# Altium footprint library P05_ECG.PcbLib: 19 footprints (part 1 of 2)
Each footprint in its own frame and in the unit in brackets; x right, y up, seen from the top. Pads: shape width x height; smd on the part's side, far side on the other; paste and mask are expansions set on the pad; w line width, h text height; cw(c..) or ccw(c..) is an arc to the next point about the centre after c.
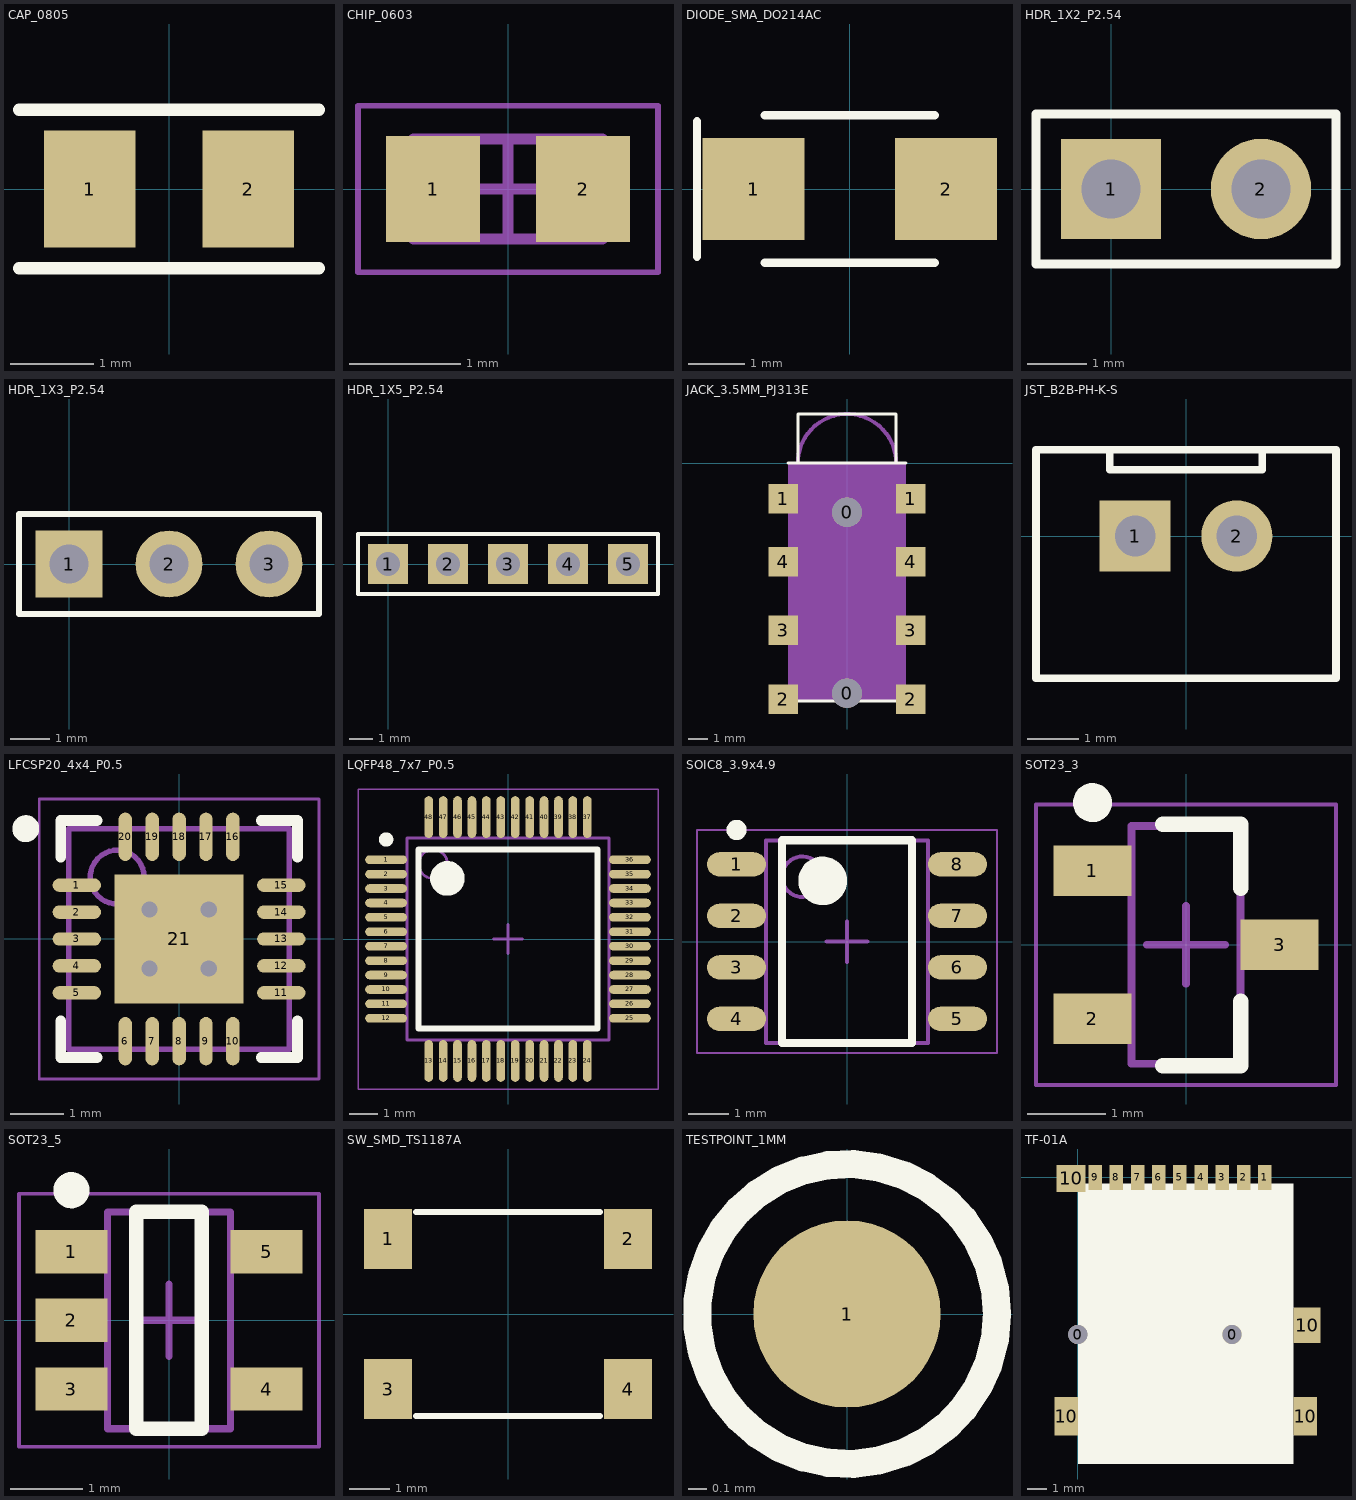
[diagram p0: the footprints below, top view; thin cyan lines are the x and y axes]

## CAP_0805 [mm] "Chip Capacitor 0805 (2012 metric)"
height 1.4
pads (2):
  rect 1.1x1.4 smd: 1(-0.95,0) 2(0.95,0)
Top Overlay:
  lines w0.15: -1.8,-0.95 1.8,-0.95 ; -1.8,0.95 1.8,0.95

## CHIP_0603 [mm] "Chip 0603 (1608 metric), dung chung R, C, ferrite bead"
height 0.8
pads (2):
  rect 0.85x0.95 smd: 1(-0.675,0) 2(0.675,0)
Mechanical 13:
  lines w0.1: -0.85,-0.45 0.85,-0.45 0.85,0.45 -0.85,0.45 -0.85,-0.45
Mechanical 15:
  lines w0.05: -1.35,-0.75 1.35,-0.75 1.35,0.75 -1.35,0.75 -1.35,-0.75
  lines w0.1: -0.45,0 0.45,0 ; 0,-0.45 0,0.45
3D body: height 0.8, standoff 0, extent 0.5,-0.45 0.85,0.45
3D body: height 0.8, standoff 0, extent -0.85,-0.45 -0.5,0.45
3D body: height 0.8, standoff 0, extent -0.5,-0.45 0.5,0.45

## DIODE_SMA_DO214AC [mm] "TVS Diode SMA DO-214AC"
height 2.29
pads (2):
  rect 1.8x1.8 smd: 1(-1.7,0) 2(1.7,0)
Top Overlay:
  lines w0.15: -2.7,-1.2 -2.7,1.2 ; -1.5,-1.3 1.5,-1.3 ; -1.5,1.3 1.5,1.3

## HDR_1X2_P2.54 [mm] "Header 1x2 Pin Pitch 2.54mm Through-Hole"
height 8.5
pads (2):
  rect 1.7x1.7 hole 1: 1(0,0)
  round 1.7 hole 1: 2(2.54,0)
Top Overlay:
  lines w0.15: -1.27,-1.27 3.81,-1.27 3.81,1.27 -1.27,1.27 -1.27,-1.27

## HDR_1X3_P2.54 [mm] "Header 1x3 Pin Pitch 2.54mm Through-Hole"
height 8.5
pads (3):
  rect 1.7x1.7 hole 1: 1(0,0)
  round 1.7 hole 1: 2(2.54,0) 3(5.08,0)
Top Overlay:
  lines w0.15: -1.27,-1.27 6.35,-1.27 6.35,1.27 -1.27,1.27 -1.27,-1.27

## HDR_1X5_P2.54 [mm] "Header 1x5 Pin Pitch 2.54mm Through-Hole (SWD)"
height 8.5
pads (5):
  rect 1.7x1.7 hole 1: 1(0,0) 2(2.54,0) 3(5.08,0) 4(7.62,0) 5(10.16,0)
Top Overlay:
  lines w0.15: -1.27,-1.27 11.43,-1.27 11.43,1.27 -1.27,1.27 -1.27,-1.27

## JACK_3.5MM_PJ313E [mm] "3.5mm SMD Audio/ECG Jack PJ-313E"
height 5
pads (10):
  round 1.5 hole 1.5 unplated: 0(0,-11.7) 0(0,-2.5)
  rect 1.5x1.5 smd: 1(-3.25,-1.8) 1(3.25,-1.8) 2(-3.25,-12) 2(3.25,-12) 3(-3.25,-8.5) 3(3.25,-8.5) 4(-3.25,-5) 4(3.25,-5)
Top Overlay:
  lines w0.15: -3,-12.1 3,-12.1 ; -3,0 3,0 ; -2.5,0 -2.5,2.5 2.5,2.5 2.5,0
Mechanical 13:
  rectangle: -3,-12.1 3,0
  lines w0.2: -2.5,0 cw(c0,0) 2.5,0
3D body: height 5, standoff 0, extent -3,-12.15 3,-0.05
3D body: height 5, standoff 0, extent -3,-12.1 3,0
3D body: height 5, standoff 0, extent 6.4,-7.8 6.9,-7.4
3D body: height 5, standoff 0, extent -3,-12.1 3,0
3D body: height 5, standoff 0, extent 0.5,-9.5 1.2,-6.4

## JST_B2B-PH-K-S [mm] "JST PH 2.0mm Pitch 2-Pin Header B2B-PH-K-S"
height 8
pads (2):
  rect 1.4x1.4 hole 0.8: 1(-1,0)
  round 1.4 hole 0.8: 2(1,0)
Top Overlay:
  lines w0.15: -1.5,1.7 -1.5,1.3 1.5,1.3 1.5,1.7 ; -2.95,-2.8 -2.95,1.7 2.95,1.7 2.95,-2.8 -2.95,-2.8

## LFCSP20_4x4_P0.5 [mm] "LFCSP20, 4x4mm body, pitch 0.5mm, exposed pad, AD8232"
height 0.8
pads (21):
  oval 0.9x0.25 smd: 1(-1.9,1) 2(-1.9,0.5) 3(-1.9,0) 4(-1.9,-0.5) 5(-1.9,-1) 11(1.9,-1) 12(1.9,-0.5) 13(1.9,0) 14(1.9,0.5) 15(1.9,1)
  oval 0.25x0.9 smd: 6(-1,-1.9) 7(-0.5,-1.9) 8(0,-1.9) 9(0.5,-1.9) 10(1,-1.9) 16(1,1.9) 17(0.5,1.9) 18(0,1.9) 19(-0.5,1.9) 20(-1,1.9)
  rect 2.4x2.4 smd: 21(0,0)
via 0.55,-0.55 diameter 0.55 hole 0.3
via -0.55,-0.55 diameter 0.55 hole 0.3
via 0.55,0.55 diameter 0.55 hole 0.3
via -0.55,0.55 diameter 0.55 hole 0.3
Top Overlay:
  circle w0.25: c-2.85,2.05 r0.125
  lines w0.2: -2.2,-1.525 -2.2,-2.2 -1.525,-2.2 ; -2.2,1.525 -2.2,2.2 -1.525,2.2 ; 1.525,-2.2 2.2,-2.2 2.2,-1.525 ; 1.525,2.2 2.2,2.2 2.2,1.525
Mechanical 13:
  circle w0.1: c-1.15,1.15 r0.5
  lines w0.1: -2.05,-2.05 2.05,-2.05 2.05,2.05 -2.05,2.05 -2.05,-2.05
Mechanical 15:
  lines w0.05: -2.6,-2.6 2.6,-2.6 2.6,2.6 -2.6,2.6 -2.6,-2.6
  lines w0.1: -0.5,0 0.5,0 ; 0,-0.5 0,0.5
3D body: height 0.8, standoff 0.02, extent -2.05,-2.05 2.05,2.05

## LQFP48_7x7_P0.5 [mm] "LQFP48, 7x7mm body, pitch 0.5mm, STM32F103C8T6"
height 1.6
pads (48):
  oval 1.45x0.3 smd: 1(-4.225,2.75) 2(-4.225,2.25) 3(-4.225,1.75) 4(-4.225,1.25) 5(-4.225,0.75) 6(-4.225,0.25) 7(-4.225,-0.25) 8(-4.225,-0.75) 9(-4.225,-1.25) 10(-4.225,-1.75) 11(-4.225,-2.25) 12(-4.225,-2.75) 25(4.225,-2.75) 26(4.225,-2.25) 27(4.225,-1.75) 28(4.225,-1.25) 29(4.225,-0.75) 30(4.225,-0.25) 31(4.225,0.25) 32(4.225,0.75) 33(4.225,1.25) 34(4.225,1.75) 35(4.225,2.25) 36(4.225,2.75)
  oval 0.3x1.45 smd: 13(-2.75,-4.225) 14(-2.25,-4.225) 15(-1.75,-4.225) 16(-1.25,-4.225) 17(-0.75,-4.225) 18(-0.25,-4.225) 19(0.25,-4.225) 20(0.75,-4.225) 21(1.25,-4.225) 22(1.75,-4.225) 23(2.25,-4.225) 24(2.75,-4.225) 37(2.75,4.225) 38(2.25,4.225) 39(1.75,4.225) 40(1.25,4.225) 41(0.75,4.225) 42(0.25,4.225) 43(-0.25,4.225) 44(-0.75,4.225) 45(-1.25,4.225) 46(-1.75,4.225) 47(-2.25,4.225) 48(-2.75,4.225)
Top Overlay:
  circle w0.6: c-2.1,2.1 r0.3
  circle w0.25: c-4.225,3.45 r0.125
  lines w0.2: -3.1,-3.1 3.1,-3.1 3.1,3.1 -3.1,3.1 -3.1,-3.1
Mechanical 13:
  circle w0.1: c-2.6,2.6 r0.5
  lines w0.1: -3.5,-3.5 3.5,-3.5 3.5,3.5 -3.5,3.5 -3.5,-3.5
Mechanical 15:
  lines w0.05: -5.2,-5.2 5.2,-5.2 5.2,5.2 -5.2,5.2 -5.2,-5.2
  lines w0.1: -0.5,0 0.5,0 ; 0,-0.5 0,0.5
3D body: height 1.6, standoff 0.05, extent -3.5,-3.5 3.5,3.5

## SOIC8_3.9x4.9 [mm] "SOIC-8, 3.9x4.9mm body, pitch 1.27mm, INA219"
height 1.75
pads (8):
  oval 1.45x0.6 smd: 1(-2.725,1.905) 2(-2.725,0.635) 3(-2.725,-0.635) 4(-2.725,-1.905) 5(2.725,-1.905) 6(2.725,-0.635) 7(2.725,0.635) 8(2.725,1.905)
Top Overlay:
  circle w0.25: c-2.725,2.755 r0.125
  circle w0.6: c-0.6,1.5 r0.3
  lines w0.2: -1.6,-2.5 -1.6,2.5 1.6,2.5 1.6,-2.5 -1.6,-2.5
Mechanical 13:
  circle w0.1: c-1.1,1.6 r0.5
  lines w0.1: -2,-2.5 -2,2.5 2,2.5 2,-2.5 -2,-2.5
Mechanical 15:
  lines w0.05: -3.7,-2.75 -3.7,2.75 3.7,2.75 3.7,-2.75 -3.7,-2.75
  lines w0.1: -0.5,0 0.5,0 ; 0,-0.5 0,0.5
3D body: height 1.75, standoff 0.1, extent -2,-2.5 2,2.5

## SOT23_3 [mm] "SOT23, 3-Leads, Body 2.86x2.37mm, Pitch 0.95mm, IPC Medium Density"
height 1.12
pads (3):
  rect 1x0.65 smd: 1(-1.2,0.95) 2(-1.2,-0.95) 3(1.2,0)
Top Overlay:
  circle w0.25: c-1.2,1.825 r0.125
  lines w0.2: -0.3,-1.55 0.7,-1.55 0.7,-0.725 ; -0.3,1.55 0.7,1.55 0.7,0.725
Mechanical 13:
  lines w0.1: -0.7,-1.525 -0.7,1.525 0.7,1.525 0.7,-1.525 -0.7,-1.525
Mechanical 15:
  lines w0.05: -1.925,-1.8 -1.925,1.8 1.925,1.8 1.925,-1.8 -1.925,-1.8
  lines w0.1: -0.5,0 0.5,0 ; 0,-0.5 0,0.5
3D body: height 1.12, standoff 0.01, extent -0.7,-1.525 0.7,1.525

## SOT23_5 [mm] "SOT-23-5, pitch 0.95mm, MCP73831"
height 1.45
pads (5):
  rect 1x0.6 smd: 1(-1.35,0.95) 2(-1.35,0) 3(-1.35,-0.95) 4(1.35,-0.95) 5(1.35,0.95)
Top Overlay:
  circle w0.25: c-1.35,1.8 r0.125
  lines w0.2: -0.45,-1.5 0.45,-1.5 0.45,1.5 -0.45,1.5 -0.45,-1.5
Mechanical 13:
  lines w0.1: -0.85,-1.5 -0.85,1.5 0.85,1.5 0.85,-1.5 -0.85,-1.5
Mechanical 15:
  lines w0.05: -2.075,-1.75 -2.075,1.75 2.075,1.75 2.075,-1.75 -2.075,-1.75
  lines w0.1: -0.5,0 0.5,0 ; 0,-0.5 0,0.5
3D body: height 1.45, standoff 0.01, extent -0.85,-1.5 0.85,1.5

## SW_SMD_TS1187A [mm] "Tactile Switch SMD 5.1x5.1mm TS-1187A"
height 1.5
pads (4):
  rect 1.2x1.5 smd: 1(-3,1.875) 2(3,1.875) 3(-3,-1.875) 4(3,-1.875)
Top Overlay:
  lines w0.15: -2.3,-2.55 2.3,-2.55 ; -2.3,2.55 2.3,2.55

## TESTPOINT_1MM [mm] "SMD Test Point Pad 1.0mm Round"
pads (1):
  round 1 smd: 1(0,0)
Top Overlay:
  circle w0.15: c0,0 r0.8

## TF-01A [mm] "Height = 1.90mm, Description = MicroSD Card Socket Push-Push TF-01A"
height 1.9
pads (15):
  round 1 hole 1 unplated: 0(0,-8.15) 0(8,-8.15)
  rect 0.7x1.3 smd: 1(9.7,0) 2(8.6,0) 3(7.5,0) 4(6.4,0) 5(5.3,0) 6(4.2,0) 7(3.1,0) 8(2,0) 9(0.9,0)
  rect 1.2x2 smd: 10(-0.6,-12.38) 10(11.8,-12.38)
  rect 1.5x1.4 smd: 10(-0.35,-0.05)
  rect 1.4x1.85 smd: 10(11.9,-7.66)
Top Overlay:
  rectangle: 0,-14.87 11.2,-0.3